# Altium schematic symbol library Capacitors_PTH.SchLib: 29 symbols
Pins are listed as number, name and electrical type; pins without a type are passive.

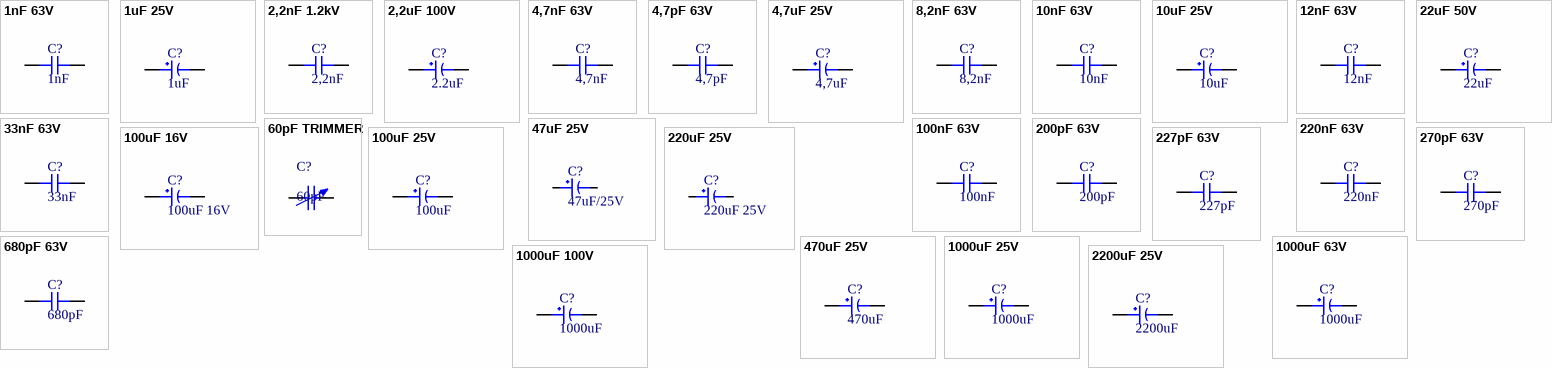
[diagram p0: symbols 1nF 63V to 2200uF 25V]

## 1nF 63V
designator C?, comment 1nF
FILM CAPACITORS 1nF 63V
footprint FILM CAPACITOR (2,5x6,5x7,3 - 5mm PITCH)
pins: 1, 2

## 1uF 25V
designator C?, comment 1uF
ELETROLYTIC CAPACITOR 1uF 25V
footprint 2mm Eletro (Cap_Ele_5x11,5mm_2mm_Pitch)
pins: 1, 2

## 2,2nF 1.2kV
designator C?, comment 2,2nF
FILM CAPACITORS 2,2nF 1.2kV - B32692
footprint 15mm_Polyester
pins: 1, 2

## 2,2uF 100V
designator C?, comment 2.2uF
ELETROLYTIC CAPACITOR 2,2uF 100V
footprint 2mm Eletro (Cap_Ele_5x11,5mm_2mm_Pitch)
pins: 1, 2

## 4,7nF 63V
designator C?, comment 4,7nF
FILM CAPACITORS 4,7nF 63V
footprint FILM CAPACITOR (2,5x6,5x7,3 - 5mm PITCH)
pins: 1, 2

## 4,7pF 63V
designator C?, comment 4,7pF
FILM CAPACITORS 4,7pF 63V
footprint CAPACITOR CERAMIC 2.54mm (2.54mm PITCH DISC CERAMIC CAPACITOR)
pins: 1, 2

## 4,7uF 25V
designator C?, comment 4,7uF
ELETROLYTIC CAPACITOR 4,7uF 25V
pins: 1, 2

## 8,2nF 63V
designator C?, comment 8,2nF
FILM CAPACITORS 8,2nF 63V
footprint FILM CAPACITOR (2,5x6,5x7,3 - 5mm PITCH)
pins: 1, 2

## 10nF 63V
designator C?, comment 10nF
FILM CAPACITORS 10nF 63V
footprint FILM CAPACITOR (2,5x6,5x7,3 - 5mm PITCH)
pins: 1, 2

## 10uF 25V
designator C?, comment 10uF
ELETROLYTIC CAPACITOR 10uF 25V
pins: 1, 2

## 12nF 63V
designator C?, comment 12nF
FILM CAPACITORS 12nF 63V
footprint FILM CAPACITOR (2,5x6,5x7,3 - 5mm PITCH)
pins: 1, 2

## 22uF 50V
designator C?, comment 22uF
ELETROLYTIC CAPACITOR 22uF 50V
footprint 2mm Eletro (Cap_Ele_5x11,5mm_2mm_Pitch)
pins: 1, 2

## 33nF 63V
designator C?, comment 33nF
FILM CAPACITORS 33nF 63V
footprint FILM CAPACITOR (2,5x6,5x7,3 - 5mm PITCH)
pins: 1, 2

## 47uF 25V
designator C?, comment 47uF/25V
ELETROLYTIC CAPACITOR 47uF 25V
footprint 2mm Eletro (Cap_Ele_5x11,5mm_2mm_Pitch)
pins: 1, 2

## 60pF TRIMMER
designator C?, comment 60pF
CAPACITOR TRIMMER MURATA 60 pF
footprint VARICAP (MURATA)
pins: 1, 2

## 100nF 63V
designator C?, comment 100nF
FILM CAPACITORS 100nF 63V
footprint 5mm film (2,5x6,5x7,3 - 5mm PITCH)
pins: 1, 2

## 100uF 16V
designator C?
CAPACITOR ELETROLITICO 100uF 16V
footprint 100uF 16V (6,3x12mm - 2.54mm)
pins: 1, 2

## 100uF 25V
designator C?, comment 100uF
ELETROLYTIC CAPACITOR 100uF 25V
footprint 2.54mm Eletrolitico (5x12 - 2.54mm pitch)
pins: 1, 2

## 200pF 63V
designator C?, comment 200pF
FILM CAPACITORS 200pF 63V
footprint CAPACITOR CERAMIC 5mm PITCH (5mm PITCH DISC CERAMIC CAPACITOR)
pins: 1, 2

## 220nF 63V
designator C?, comment 220nF
FILM CAPACITORS 220nF 63V
footprint FILM CAPACITOR (2,5x6,5x7,3 - 5mm PITCH)
pins: 1, 2

## 220uF 25V
designator C?
ELETROLYTIC CAPACITOR 100uF 25V
footprint 8x14 - 3.5mm pitch
pins: 1, 2

## 227pF 63V
designator C?, comment 227pF
FILM CAPACITORS 227pF 63V
footprint CAPACITOR CERAMIC 5mm PITCH (5mm PITCH DISC CERAMIC CAPACITOR)
pins: 1, 2

## 270pF 63V
designator C?, comment 270pF
FILM CAPACITORS 270pF 63V
footprint CAPACITOR CERAMIC 5mm PITCH (5mm PITCH DISC CERAMIC CAPACITOR)
pins: 1, 2

## 470uF 25V
designator C?, comment 470uF
ELETROLYTIC CAPACITOR 470uF 25V
footprint 470uF 25V
pins: 1, 2

## 680pF 63V
designator C?, comment 680pF
FILM CAPACITORS 680pF 63V
footprint CAPACITOR CERAMIC 5mm PITCH (5mm PITCH DISC CERAMIC CAPACITOR)
pins: 1, 2

## 1000uF 25V
designator C?, comment 1000uF
ELETROLYTIC CAPACITOR 1000uF 25V
pins: 1, 2

## 1000uF 63V
designator C?, comment 1000uF
Horiz. CAPACITOR 1000uF 63V
footprint 1000uF 63V Horiz.
pins: 1, 2

## 1000uF 100V
designator C?, comment 1000uF
CAPACITOR 1000uF 100V EPCOS; Modelo: B41845
footprint 1000uF 100V Epcos (8mm Pitch)
pins: 1, 2

## 2200uF 25V
designator C?, comment 2200uF
ELETROLYTIC CAPACITOR 2200uF 25V
footprint 2200uF 25V
pins: 1, 2